# Altium footprint library PcbLib1.PcbLib: 9 footprints
Each footprint in its own frame and in the unit in brackets; x right, y up, seen from the top. Pads: shape width x height; smd on the part's side, far side on the other; paste and mask are expansions set on the pad; w line width, h text height; cw(c..) or ccw(c..) is an arc to the next point about the centre after c.
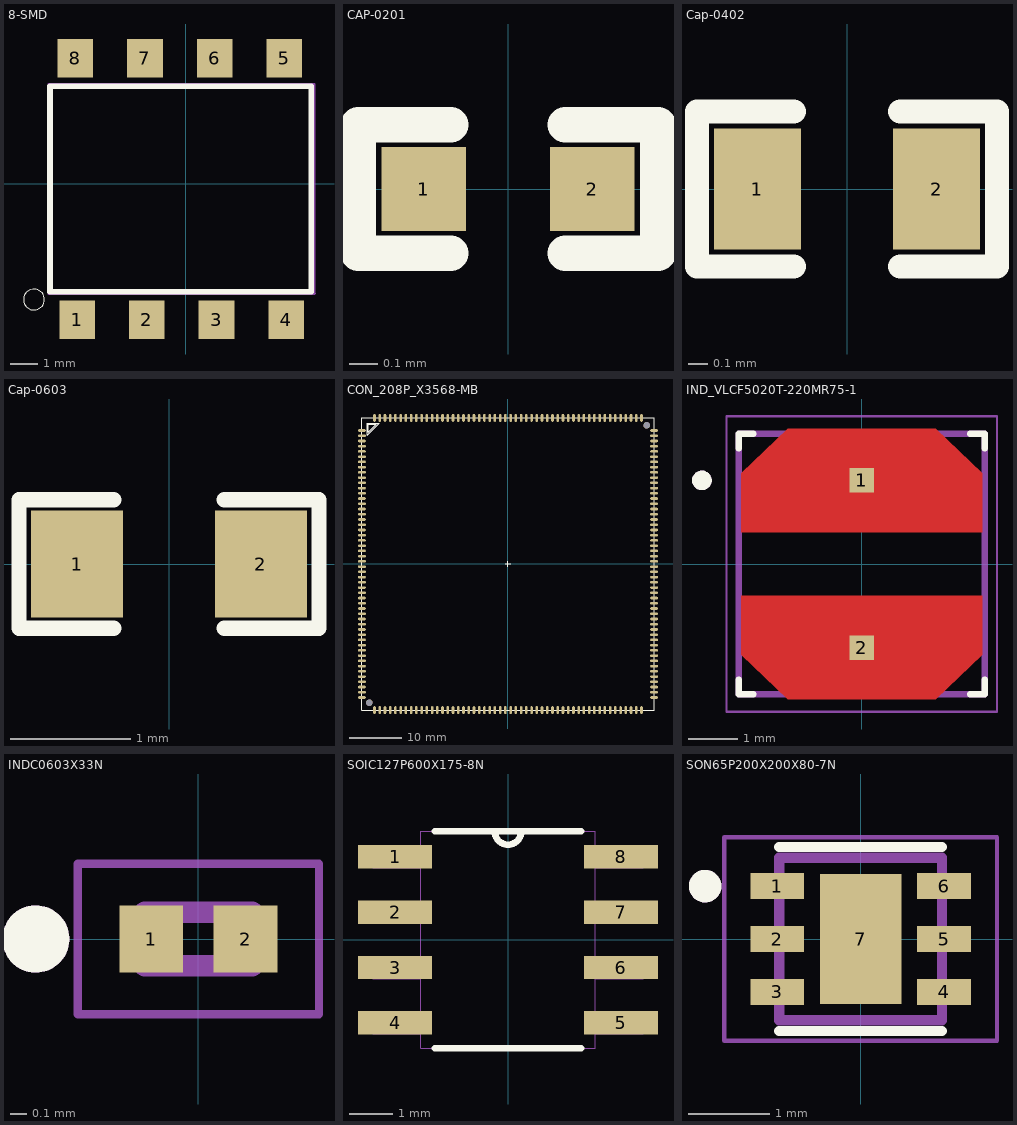
[diagram p0: the footprints below, top view; thin cyan lines are the x and y axes]

## 8-SMD [mm]
pads (8):
  rect 1.3x1.4 smd: 1(-3.96,-4.96) 2(-1.42,-4.96) 3(1.12,-4.96) 4(3.66,-4.96) 5(3.59,4.58) 6(1.05,4.58) 7(-1.49,4.58) 8(-4.03,4.58)
Top Overlay:
  circle w0: c-5.538,-4.221 r0.381
  lines w0.203: -4.953,-3.937 -4.953,3.556 4.572,3.556 4.572,-3.937 -4.953,-3.937
Mechanical 13:
  lines w0.1: 4.68,-3.98 4.68,3.62 -5,3.62 -5,-4 4.69,-4
3D body "step_temp.STEP": height 4.6, standoff 0, extent -5.08,-4.84 5.08,4.84

## CAP-0201 [mm]
pads (2):
  rect 0.3x0.3 smd mask+0.055: 1(-0.3,0) 2(0.3,0)
Top Overlay:
  lines w0.127: -0.203,-0.229 -0.533,-0.229 -0.533,0.229 -0.203,0.229 ; 0.203,-0.229 0.533,-0.229 0.533,0.229 0.203,0.229
3D body "User Library-SMD Ceramic Capacitors_0201 (0603)_AB.STEP": height 0.28, standoff -0.02, extent -0.3,-0.15 0.301,0.15

## Cap-0402 [mil]
pads (2):
  rect 18x25 smd mask+2.36: 1(-18.5,0) 2(18.5,0)
Top Overlay:
  lines w5: -11,-16 -31,-16 -31,16 -11,16 ; 11,-16 31,-16 31,16 11,16
3D body "User Library-Capacitor 0402.step": height 18.5, standoff -1.18, extent -19.68,-9.84 19.7,9.85

## Cap-0603 [mil]
pads (2):
  rect 30x35 smd mask+2.36: 1(-30,0) 2(30,0)
Top Overlay:
  lines w5: -18,-21 -49,-21 -49,21 -18,21 ; 18,-21 49,-21 49,21 18,21
3D body "User Library-CAPC1608X09.step": height 34.25, standoff -1.18, extent -31.51,-15.75 31.49,15.74

## CON_208P_X3568-MB [mm]
height 1
pads (210):
  oval 1.5x0.5 smd: 1(-27.9,25.5) 2(-27.9,24.5) 3(-27.9,23.5) 4(-27.9,22.5) 5(-27.9,21.5) 6(-27.9,20.5) 7(-27.9,19.5) 8(-27.9,18.5) 9(-27.9,17.5) 10(-27.9,16.5) 11(-27.9,15.5) 12(-27.9,14.5) 13(-27.9,13.5) 14(-27.9,12.5) 15(-27.9,11.5) 16(-27.9,10.5) 17(-27.9,9.5) 18(-27.9,8.5) 19(-27.9,7.5) 20(-27.9,6.5) 21(-27.9,5.5) 22(-27.9,4.5) 23(-27.9,3.5) 24(-27.9,2.5) 25(-27.9,1.5) 26(-27.9,0.5) 27(-27.9,-0.5) 28(-27.9,-1.5) 29(-27.9,-2.5) 30(-27.9,-3.5) 31(-27.9,-4.5) 32(-27.9,-5.5) 33(-27.9,-6.5) 34(-27.9,-7.5) 35(-27.9,-8.5) 36(-27.9,-9.5) 37(-27.9,-10.5) 38(-27.9,-11.5) 39(-27.9,-12.5) 40(-27.9,-13.5) 41(-27.9,-14.5) 42(-27.9,-15.5) 43(-27.9,-16.5) 44(-27.9,-17.5) 45(-27.9,-18.5) 46(-27.9,-19.5) 47(-27.9,-20.5) 48(-27.9,-21.5) 49(-27.9,-22.5) 50(-27.9,-23.5) 51(-27.9,-24.5) 52(-27.9,-25.5) 105(27.9,-25.5) 106(27.9,-24.5) 107(27.9,-23.5) 108(27.9,-22.5) 109(27.9,-21.5) 110(27.9,-20.5) 111(27.9,-19.5) 112(27.9,-18.5) 113(27.9,-17.5) 114(27.9,-16.5) 115(27.9,-15.5) 116(27.9,-14.5) 117(27.9,-13.5) 118(27.9,-12.5) 119(27.9,-11.5) 120(27.9,-10.5) 121(27.9,-9.5) 122(27.9,-8.5) 123(27.9,-7.5) 124(27.9,-6.5) 125(27.9,-5.5) 126(27.9,-4.5) 127(27.9,-3.5) 128(27.9,-2.5) 129(27.9,-1.5) 130(27.9,-0.5) 131(27.9,0.5) 132(27.9,1.5) 133(27.9,2.5) 134(27.9,3.5) 135(27.9,4.5) 136(27.9,5.5) 137(27.9,6.5) 138(27.9,7.5) 139(27.9,8.5) 140(27.9,9.5) 141(27.9,10.5) 142(27.9,11.5) 143(27.9,12.5) 144(27.9,13.5) 145(27.9,14.5) 146(27.9,15.5) 147(27.9,16.5) 148(27.9,17.5) 149(27.9,18.5) 150(27.9,19.5) 151(27.9,20.5) 152(27.9,21.5) 153(27.9,22.5) 154(27.9,23.5) 155(27.9,24.5) 156(27.9,25.5)
  oval 0.5x1.5 smd: 53(-25.5,-27.9) 54(-24.5,-27.9) 55(-23.5,-27.9) 56(-22.5,-27.9) 57(-21.5,-27.9) 58(-20.5,-27.9) 59(-19.5,-27.9) 60(-18.5,-27.9) 61(-17.5,-27.9) 62(-16.5,-27.9) 63(-15.5,-27.9) 64(-14.5,-27.9) 65(-13.5,-27.9) 66(-12.5,-27.9) 67(-11.5,-27.9) 68(-10.5,-27.9) 69(-9.5,-27.9) 70(-8.5,-27.9) 71(-7.5,-27.9) 72(-6.5,-27.9) 73(-5.5,-27.9) 74(-4.5,-27.9) 75(-3.5,-27.9) 76(-2.5,-27.9) 77(-1.5,-27.9) 78(-0.5,-27.9) 79(0.5,-27.9) 80(1.5,-27.9) 81(2.5,-27.9) 82(3.5,-27.9) 83(4.5,-27.9) 84(5.5,-27.9) 85(6.5,-27.9) 86(7.5,-27.9) 87(8.5,-27.9) 88(9.5,-27.9) 89(10.5,-27.9) 90(11.5,-27.9) 91(12.5,-27.9) 92(13.5,-27.9) 93(14.5,-27.9) 94(15.5,-27.9) 95(16.5,-27.9) 96(17.5,-27.9) 97(18.5,-27.9) 98(19.5,-27.9) 99(20.5,-27.9) 100(21.5,-27.9) 101(22.5,-27.9) 102(23.5,-27.9) 103(24.5,-27.9) 104(25.5,-27.9) 157(25.5,27.9) 158(24.5,27.9) 159(23.5,27.9) 160(22.5,27.9) 161(21.5,27.9) 162(20.5,27.9) 163(19.5,27.9) 164(18.5,27.9) 165(17.5,27.9) 166(16.5,27.9) 167(15.5,27.9) 168(14.5,27.9) 169(13.5,27.9) 170(12.5,27.9) 171(11.5,27.9) 172(10.5,27.9) 173(9.5,27.9) 174(8.5,27.9) 175(7.5,27.9) 176(6.5,27.9) 177(5.5,27.9) 178(4.5,27.9) 179(3.5,27.9) 180(2.5,27.9) 181(1.5,27.9) 182(0.5,27.9) 183(-0.5,27.9) 184(-1.5,27.9) 185(-2.5,27.9) 186(-3.5,27.9) 187(-4.5,27.9) 188(-5.5,27.9) 189(-6.5,27.9) 190(-7.5,27.9) 191(-8.5,27.9) 192(-9.5,27.9) 193(-10.5,27.9) 194(-11.5,27.9) 195(-12.5,27.9) 196(-13.5,27.9) 197(-14.5,27.9) 198(-15.5,27.9) 199(-16.5,27.9) 200(-17.5,27.9) 201(-18.5,27.9) 202(-19.5,27.9) 203(-20.5,27.9) 204(-21.5,27.9) 205(-22.5,27.9) 206(-23.5,27.9) 207(-24.5,27.9) 208(-25.5,27.9)
  round 1.2 hole 1.2 unplated: 209(26.5,26.5) 210(-26.5,-26.5)
Top Overlay:
  lines w0.2: -0.5,0 0,0 ; 0,-0.5 0,0 ; 0,0.5 0,0 ; 0.5,0 0,0 ; -27.9,-27.9 -27.9,27.9 27.9,27.9 27.9,-27.9 -27.9,-27.9 ; -26.9,24.56 -24.56,26.9 -26.9,26.9 -26.9,24.56 ; -26.646,25.146 -25.146,26.646 -26.646,26.646 -26.646,25.146

## IND_VLCF5020T-220MR75-1 [mm]
height 2
pads (2):
  rect 0.5x0.5 smd paste-1 mask+0: 1(0,1.7) 2(0,-1.7)
Top Layer:
  region: 2.45,-1.85 1.5,-2.75 -1.5,-2.75 -2.45,-1.85 -2.45,-0.65 2.45,-0.65
  region: 2.45,1.85 2.45,0.65 -2.45,0.65 -2.45,1.85 -1.5,2.75 1.5,2.75
Top Overlay:
  circle w0.2: c-3.25,1.7 r0.1
  lines w0.127: -2.5,-2.35 -2.5,-2.65 -2.2,-2.65 ; -2.5,2.35 -2.5,2.65 -2.2,2.65 ; 2.2,-2.65 2.5,-2.65 2.5,-2.35 ; 2.2,2.65 2.5,2.65 2.5,2.35
Top Paste:
  region: 2.45,-1.85 1.5,-2.75 -1.5,-2.75 -2.45,-1.85 -2.45,-0.65 2.45,-0.65
  region: 2.45,1.85 2.45,0.65 -2.45,0.65 -2.45,1.85 -1.5,2.75 1.5,2.75
Top Solder:
  region: 2.55,-1.95 1.6,-2.85 -1.6,-2.85 -2.55,-1.95 -2.55,-0.55 2.55,-0.55
  region: 2.55,1.95 2.55,0.55 -2.55,0.55 -2.55,1.95 -1.6,2.85 1.6,2.85
Mechanical 13:
  circle w0.2: c-3.25,1.7 r0.1
  lines w0.127: -2.5,-2.65 2.5,-2.65 2.5,2.65 -2.5,2.65 -2.5,-2.65
Mechanical 15:
  lines w0.05: -2.75,-3 2.75,-3 2.75,3 -2.75,3 -2.75,-3
3D body "step_temp.STEP": height 2, standoff 0, extent -2.5,-2.5 2.5,2.5

## INDC0603X33N [mm]
pads (2):
  rect 0.38x0.4 smd: 1(-0.281,0) 2(0.281,0)
Top Overlay:
  circle w0.2: c-0.968,0 r0.1
Mechanical 13:
  circle w0.2: c-0.968,0 r0.1
  lines w0.127: -0.32,-0.16 -0.32,0.16 0.32,0.16 0.32,-0.16 -0.32,-0.16
Mechanical 15:
  lines w0.05: -0.718,-0.448 -0.718,0.448 0.718,0.448 0.718,-0.448 -0.718,-0.448

## SOIC127P600X175-8N [mil]
pads (8):
  rect 67x21 smd: 1(-102,75) 2(-102,25) 3(-102,-25) 4(-102,-75) 5(102,-75) 6(102,-25) 7(102,25) 8(102,75)
Top Overlay:
  lines w6: -66,-98 66,-98 ; -66,98 -12,98 ; 66,98 12,98 ; -12,98 ccw(c0,98) 12,98 ; -12,98 12,98
Mechanical 13:
  lines w0: -12,98 ccw(c0,98) 12,98 ; -12,98 -79,98 -79,-98 79,-98 79,98 12,98 ; -12,98 12,98 ; -122,-85 -79,-85 -79,-65 -122,-65 -122,-85 ; -122,-35 -79,-35 -79,-15 -122,-15 -122,-35 ; -122,15 -79,15 -79,35 -122,35 -122,15 ; -122,65 -79,65 -79,85 -122,85 -122,65 ; 79,-85 122,-85 122,-65 79,-65 79,-85 ; 79,-35 122,-35 122,-15 79,-15 79,-35 ; 79,15 122,15 122,35 79,35 79,15 ; 79,65 122,65 122,85 79,85 79,65

## SON65P200X200X80-7N [mm]
pads (7):
  rect 0.66x0.32 smd: 1(-1.025,0.65) 2(-1.025,0) 3(-1.025,-0.65) 4(1.025,-0.65) 5(1.025,0) 6(1.025,0.65)
  rect 1x1.6 smd paste-2: 7(0,0)
Top Overlay:
  circle w0.2: c-1.91,0.65 r0.1
  lines w0.127: -1,-1.13 1,-1.13 ; -1,1.13 1,1.13
Top Paste:
  region: 0.316,-0.506 -0.316,-0.506 -0.316,0.506 0.316,0.506
Mechanical 13:
  circle w0.2: c-1.91,0.65 r0.1
  lines w0.127: -1,-1 -1,1 1,1 1,-1 -1,-1
Mechanical 15:
  lines w0.05: -1.675,-1.25 -1.675,1.25 1.675,1.25 1.675,-1.25 -1.675,-1.25
3D body "step_temp.STEP": height 0.8, standoff 0, extent -1,-1 1,1